# Altium footprint library PcbLib1.PcbLib: 25 footprints (part 2 of 2)
Each footprint in its own frame and in the unit in brackets; x right, y up, seen from the top. Pads: shape width x height; smd on the part's side, far side on the other; paste and mask are expansions set on the pad; w line width, h text height; cw(c..) or ccw(c..) is an arc to the next point about the centre after c.
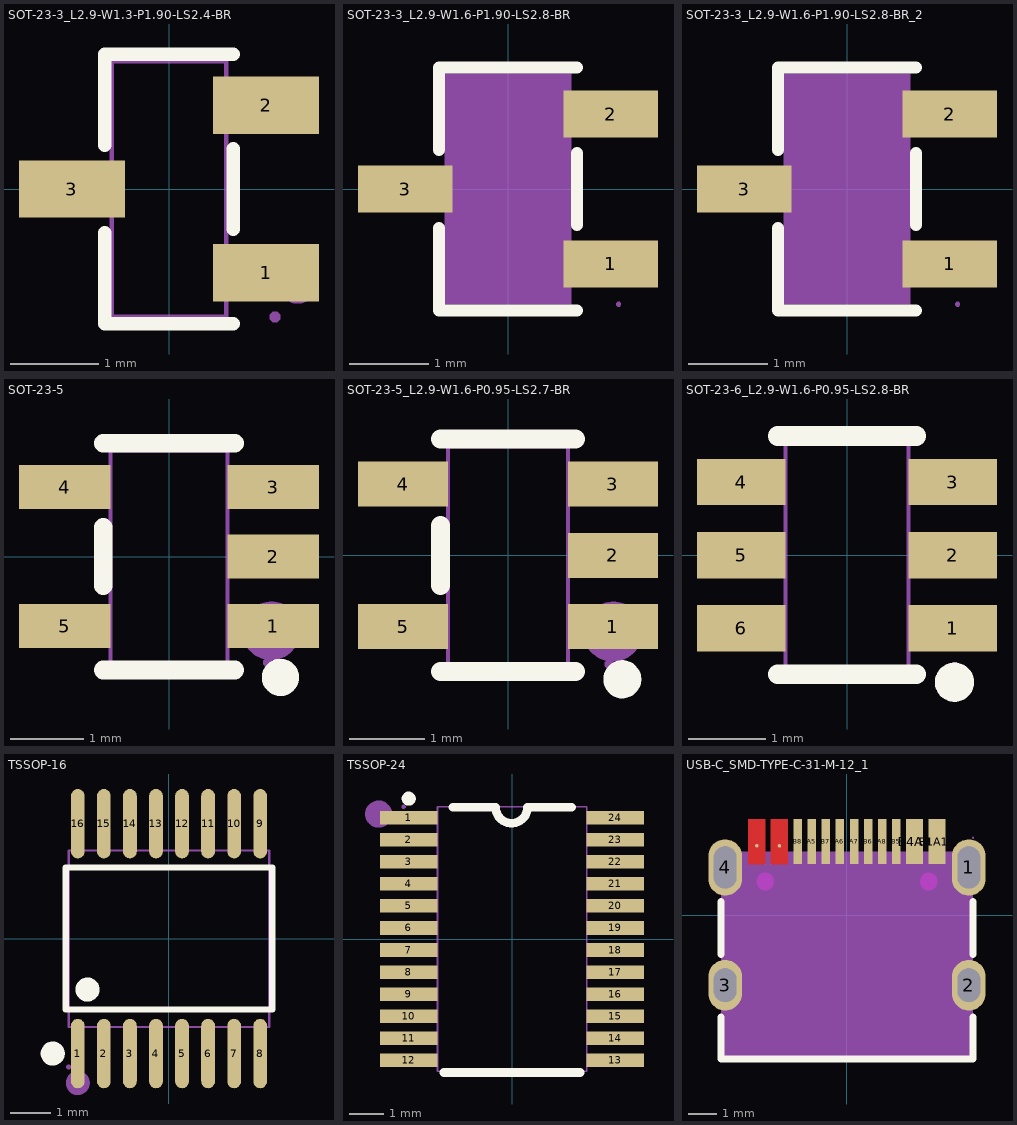
[diagram p1: the footprints below, top view; thin cyan lines are the x and y axes]

## SOT-23-3_L2.9-W1.3-P1.90-LS2.4-BR [mm]
pads (3):
  rect 1.2x0.65 smd: 1(1.1,-0.95) 2(1.1,0.95) 3(-1.1,0)
Top Overlay:
  lines w0.152: -0.726,-0.495 -0.726,-1.526 0.726,-1.526 ; -0.726,0.495 -0.726,1.526 0.726,1.526 ; 0.726,-0.455 0.726,0.455
Mechanical 6:
  circle w0.2: c1.46,-1.1 r0.1
Mechanical 15:
  region: -1.2,-0.215 -1.2,0.215 -0.9,0.215 -0.9,-0.215
  region: -0.91,-0.215 -0.91,0.215 -0.64,0.215 -0.64,-0.215
  region: 0.9,-1.165 0.9,-0.735 1.2,-0.735 1.2,-1.165
  region: 0.64,-1.165 0.64,-0.735 0.91,-0.735 0.91,-1.165
  region: 0.9,0.735 0.9,1.165 1.2,1.165 1.2,0.735
  region: 0.64,0.735 0.64,1.165 0.91,1.165 0.91,0.735
  region: 1.26,-1.45 1.26,-1.475 1.225,-1.51 1.175,-1.51 1.14,-1.475 1.14,-1.45 1.14,-1.425 1.175,-1.39 1.225,-1.39 1.26,-1.425 1.26,-1.45
  lines w0.051: -0.65,-1.45 0.65,-1.45 0.65,1.45 -0.65,1.45 -0.65,-1.45

## SOT-23-3_L2.9-W1.6-P1.90-LS2.8-BR [mm]
pads (3):
  rect 1.2x0.6 smd paste+0 mask+0.051: 1(1.3,-0.95) 2(1.3,0.95) 3(-1.3,0)
Top Overlay:
  lines w0.152: -0.876,-0.495 -0.876,-1.536 0.876,-1.536 ; -0.876,0.495 -0.876,1.536 0.876,1.536 ; 0.876,-0.455 0.876,0.455
Mechanical 6:
  circle w0.2: c1.651,-0.95 r0.1
Mechanical 15:
  region: 1.43,-1.46 1.43,-1.472 1.412,-1.49 1.388,-1.49 1.37,-1.472 1.37,-1.46 1.37,-1.448 1.388,-1.43 1.412,-1.43 1.43,-1.448 1.43,-1.46
  region: -0.8,-1.46 -0.8,1.46 0.8,1.46 0.8,-1.46
  region: 0.95,-1.15 0.95,-0.75 1.4,-0.75 1.4,-1.15
  region: 0.79,-1.15 0.79,-0.75 0.96,-0.75 0.96,-1.15
  region: 0.95,0.75 0.95,1.15 1.4,1.15 1.4,0.75
  region: 0.79,0.75 0.79,1.15 0.96,1.15 0.96,0.75
  region: -0.95,-0.2 -0.95,0.2 -1.4,0.2 -1.4,-0.2
  region: -0.96,-0.2 -0.96,0.2 -0.79,0.2 -0.79,-0.2

## SOT-23-3_L2.9-W1.6-P1.90-LS2.8-BR_2 [mm]
pads (3):
  rect 1.2x0.6 smd paste+0 mask+0.051: 1(1.3,-0.95) 2(1.3,0.95) 3(-1.3,0)
Top Overlay:
  lines w0.152: -0.876,-0.495 -0.876,-1.536 0.876,-1.536 ; -0.876,0.495 -0.876,1.536 0.876,1.536 ; 0.876,-0.455 0.876,0.455
Mechanical 6:
  circle w0.2: c1.651,-0.95 r0.1
Mechanical 15:
  region: 1.43,-1.46 1.43,-1.472 1.412,-1.49 1.388,-1.49 1.37,-1.472 1.37,-1.46 1.37,-1.448 1.388,-1.43 1.412,-1.43 1.43,-1.448 1.43,-1.46
  region: -0.8,-1.46 -0.8,1.46 0.8,1.46 0.8,-1.46
  region: 0.95,-1.15 0.95,-0.75 1.4,-0.75 1.4,-1.15
  region: 0.79,-1.15 0.79,-0.75 0.96,-0.75 0.96,-1.15
  region: 0.95,0.75 0.95,1.15 1.4,1.15 1.4,0.75
  region: 0.79,0.75 0.79,1.15 0.96,1.15 0.96,0.75
  region: -0.95,-0.2 -0.95,0.2 -1.4,0.2 -1.4,-0.2
  region: -0.96,-0.2 -0.96,0.2 -0.79,0.2 -0.79,-0.2

## SOT-23-5 [mm]
pads (5):
  rect 1.25x0.6 smd: 1(1.425,-0.95) 2(1.425,0) 3(1.425,0.95) 4(-1.425,0.95) 5(-1.425,-0.95)
Top Overlay:
  circle w0.254: c1.524,-1.651 r0.127
  lines w0.254: -0.9,-1.55 0.9,-1.55 ; -0.9,-0.4 -0.9,0.4 ; -0.9,1.55 0.9,1.55
Mechanical 6:
  circle w0.4: c1.397,-1.016 r0.2
Mechanical 15:
  region: 0.95,-1.15 0.95,-0.75 1.35,-0.75 1.35,-1.15
  region: 0.79,-1.15 0.79,-0.75 0.96,-0.75 0.96,-1.15
  region: 0.95,-0.2 0.95,0.2 1.35,0.2 1.35,-0.2
  region: 0.79,-0.2 0.79,0.2 0.96,0.2 0.96,-0.2
  region: 0.95,0.75 0.95,1.15 1.35,1.15 1.35,0.75
  region: 0.79,0.75 0.79,1.15 0.96,1.15 0.96,0.75
  region: -1.35,0.75 -1.35,1.15 -0.95,1.15 -0.95,0.75
  region: -0.96,0.75 -0.96,1.15 -0.79,1.15 -0.79,0.75
  region: -1.35,-1.15 -1.35,-0.75 -0.95,-0.75 -0.95,-1.15
  region: -0.96,-1.15 -0.96,-0.75 -0.79,-0.75 -0.79,-1.15
  region: 1.41,-1.45 1.41,-1.475 1.375,-1.51 1.325,-1.51 1.29,-1.475 1.29,-1.45 1.29,-1.425 1.325,-1.39 1.375,-1.39 1.41,-1.425 1.41,-1.45
  lines w0.051: -0.8,-1.45 0.8,-1.45 0.8,1.45 -0.8,1.45 -0.8,-1.45

## SOT-23-5_L2.9-W1.6-P0.95-LS2.7-BR [mm] "AP2112K-3.3TRG1(MS)"
pads (5):
  rect 1.2x0.6 smd: 1(1.4,-0.95) 2(1.4,0) 3(1.4,0.95) 4(-1.4,0.95) 5(-1.4,-0.95)
Top Overlay:
  circle w0.254: c1.524,-1.651 r0.127
  lines w0.254: -0.9,-1.55 0.9,-1.55 ; -0.9,-0.4 -0.9,0.4 ; -0.9,1.55 0.9,1.55
Mechanical 6:
  circle w0.4: c1.397,-1.016 r0.2
Mechanical 15:
  region: 1.41,-1.45 1.41,-1.475 1.375,-1.51 1.325,-1.51 1.29,-1.475 1.29,-1.45 1.29,-1.425 1.325,-1.39 1.375,-1.39 1.41,-1.425 1.41,-1.45
  region: -0.96,-1.15 -0.96,-0.75 -0.79,-0.75 -0.79,-1.15
  region: -1.35,-1.15 -1.35,-0.75 -0.95,-0.75 -0.95,-1.15
  region: -0.96,0.75 -0.96,1.15 -0.79,1.15 -0.79,0.75
  region: -1.35,0.75 -1.35,1.15 -0.95,1.15 -0.95,0.75
  region: 0.79,0.75 0.79,1.15 0.96,1.15 0.96,0.75
  region: 0.95,0.75 0.95,1.15 1.35,1.15 1.35,0.75
  region: 0.79,-0.2 0.79,0.2 0.96,0.2 0.96,-0.2
  region: 0.95,-0.2 0.95,0.2 1.35,0.2 1.35,-0.2
  region: 0.79,-1.15 0.79,-0.75 0.96,-0.75 0.96,-1.15
  region: 0.95,-1.15 0.95,-0.75 1.35,-0.75 1.35,-1.15
  lines w0.051: -0.8,-1.45 -0.8,1.45 0.8,1.45 0.8,-1.45 -0.8,-1.45

## SOT-23-6_L2.9-W1.6-P0.95-LS2.8-BR [mm]
pads (6):
  rect 1.15x0.6 smd paste+0 mask+0.051: 1(1.375,-0.95) 2(1.375,0) 3(1.375,0.95) 4(-1.375,0.95) 5(-1.375,0) 6(-1.375,-0.95)
Top Overlay:
  circle w0.254: c1.397,-1.651 r0.127
  lines w0.254: -0.9,-1.55 0.9,-1.55 ; -0.9,1.55 0.9,1.55
Mechanical 6:
  circle w0.2: c1.4,-0.95 r0.1
Mechanical 15:
  region: 0.935,1.165 0.935,0.735 0.79,0.735 0.79,1.165
  region: 0.935,0.215 0.935,-0.215 0.79,-0.215 0.79,0.215
  region: 0.935,-0.735 0.935,-1.165 0.79,-1.165 0.79,-0.735
  region: -0.935,-1.165 -0.935,-0.735 -0.79,-0.735 -0.79,-1.165
  region: -0.935,-0.215 -0.935,0.215 -0.79,0.215 -0.79,-0.215
  region: 0.925,-1.165 0.925,-0.735 1.4,-0.735 1.4,-1.165
  region: 0.925,-0.215 0.925,0.215 1.4,0.215 1.4,-0.215
  region: 0.925,0.735 0.925,1.165 1.4,1.165 1.4,0.735
  region: -0.935,0.735 -0.935,1.165 -0.79,1.165 -0.79,0.735
  region: -0.925,0.735 -0.925,1.165 -1.4,1.165 -1.4,0.735
  region: -0.925,-0.215 -0.925,0.215 -1.4,0.215 -1.4,-0.215
  region: -0.925,-1.165 -0.925,-0.735 -1.4,-0.735 -1.4,-1.165
  region: 1.46,-1.45 1.46,-1.475 1.425,-1.51 1.375,-1.51 1.34,-1.475 1.34,-1.45 1.34,-1.425 1.375,-1.39 1.425,-1.39 1.46,-1.425 1.46,-1.45
  lines w0.051: -0.8,-1.45 0.8,-1.45 0.8,1.45 -0.8,1.45 -0.8,-1.45

## TSSOP-16 [mm]
pads (16):
  oval 0.343x1.731 smd: 1(-2.275,-2.866) 2(-1.625,-2.866) 3(-0.975,-2.866) 4(-0.325,-2.866) 5(0.325,-2.866) 6(0.975,-2.866) 7(1.625,-2.866) 8(2.275,-2.866) 9(2.275,2.866) 10(1.625,2.866) 11(0.975,2.866) 12(0.325,2.866) 13(-0.325,2.866) 14(-0.975,2.866) 15(-1.625,2.866) 16(-2.275,2.866)
Top Overlay:
  circle w0.3: c-2.032,-1.27 r0.15
  circle w0.3: c-2.899,-2.866 r0.15
  lines w0.152: -2.576,-1.771 -2.576,1.772 2.576,1.772 2.576,-1.771 -2.576,-1.771
Mechanical 6:
  circle w0.3: c-2.275,-3.6 r0.15
Mechanical 15:
  drawing of 37 lines, arcs and shapes, not listed

## TSSOP-24 [mm]
pads (24):
  rect 1.7x0.4 smd: 1(-3.048,3.575) 2(-3.048,2.925) 3(-3.048,2.275) 4(-3.048,1.625) 5(-3.048,0.975) 6(-3.048,0.325) 7(-3.048,-0.325) 8(-3.048,-0.975) 9(-3.048,-1.625) 10(-3.048,-2.275) 11(-3.048,-2.925) 12(-3.048,-3.575) 13(3.048,-3.575) 14(3.048,-2.925) 15(3.048,-2.275) 16(3.048,-1.625) 17(3.048,-0.975) 18(3.048,-0.325) 19(3.048,0.325) 20(3.048,0.975) 21(3.048,1.625) 22(3.048,2.275) 23(3.048,2.925) 24(3.048,3.575)
Top Overlay:
  circle w0.254: c-3.048,4.14 r0.08
  lines w0.254: -2.007,-3.937 2.007,-3.937 ; -1.753,3.886 -0.483,3.886 ccw(c-0.013,3.886) 0.457,3.886 ; 0.483,3.886 1.753,3.886
Mechanical 6:
  circle w0.4: c-3.937,3.683 r0.2
Mechanical 15:
  drawing of 53 lines, arcs and shapes, not listed

## USB-C_SMD-TYPE-C-31-M-12_1 [mm]
pads (16):
  oval 1.2x2 hole 0.8 slot 1.5 at 90 deg paste-2539.97 mask+0.051: 1(4.325,1.706) 4(-4.325,1.706)
  oval 1.2x1.8 hole 0.8 slot 1.2 at 90 deg copper offset 0,0 paste-2539.97 mask+0.051: 2(4.325,-2.474) 3(-4.325,-2.474)
  round 0.12 smd: A1B12(-3.2,2.474) A4B9(-2.4,2.474)
  rect 0.3x1.6 smd paste+0 mask+0.025: A5(-1.25,2.624) A6(-0.25,2.624) A7(0.25,2.624) A8(1.25,2.624) B5(1.75,2.624) B6(0.75,2.624) B7(-0.75,2.624) B8(-1.75,2.624)
  rect 0.6x1.6 smd paste+0 mask+0.025: B1A12(3.2,2.624) B4A9(2.4,2.624)
Top Layer:
  region: -2.1,1.824 -2.4,1.824 -2.7,1.824 -2.7,3.424 -2.4,3.424 -2.1,3.424
  region: -2.9,1.824 -3.2,1.824 -3.5,1.824 -3.5,3.424 -3.2,3.424 -2.9,3.424
Top Overlay:
  lines w0.254: -4.469,-3.613 -4.469,-5.094 4.471,-5.094 4.471,-3.612 ; -4.469,-1.376 -4.469,0.487 ; 4.471,-1.376 4.471,0.488
Top Paste:
  drawing of 16 lines, arcs and shapes, not listed
Keep-Out Layer:
  board cut-out: 3.2,1.206 3.2,1.146 3.154,1.036 3.07,0.951 2.96,0.906 2.84,0.906 2.73,0.951 2.646,1.036 2.6,1.146 2.6,1.206 2.6,1.265 2.646,1.376 2.73,1.46 2.84,1.506 2.96,1.506 3.07,1.46 3.154,1.376 3.2,1.265 3.2,1.206
  board cut-out: -2.6,1.206 -2.6,1.146 -2.646,1.036 -2.73,0.951 -2.84,0.906 -2.96,0.906 -3.07,0.951 -3.154,1.036 -3.2,1.146 -3.2,1.206 -3.2,1.265 -3.154,1.376 -3.07,1.46 -2.96,1.506 -2.84,1.506 -2.73,1.46 -2.646,1.376 -2.6,1.265 -2.6,1.206
Keep-Out Layer:
  circle w0.025: c2.9,1.206 r0.3
  circle w0.025: c-2.9,1.206 r0.3
  region: 3.2,1.206 3.2,1.146 3.154,1.036 3.07,0.951 2.96,0.906 2.84,0.906 2.73,0.951 2.646,1.036 2.6,1.146 2.6,1.206 2.6,1.265 2.646,1.376 2.73,1.46 2.84,1.506 2.96,1.506 3.07,1.46 3.154,1.376 3.2,1.265 3.2,1.206
  region: -2.6,1.206 -2.6,1.146 -2.646,1.036 -2.73,0.951 -2.84,0.906 -2.96,0.906 -3.07,0.951 -3.154,1.036 -3.2,1.146 -3.2,1.206 -3.2,1.265 -3.154,1.376 -3.07,1.46 -2.96,1.506 -2.84,1.506 -2.73,1.46 -2.646,1.376 -2.6,1.265 -2.6,1.206
Mechanical 1:
  circle w0.025: c2.9,1.206 r0.3
  circle w0.025: c-2.9,1.206 r0.3
Mechanical 6:
  circle w0.25: c-2.9,1.206 r0.125
  circle w0.25: c2.9,1.206 r0.125
Mechanical 15:
  region: 3,2.756 3.4,2.756 3.4,2.056 3,2.056
  region: 2.2,2.756 2.6,2.756 2.6,2.056 2.2,2.056
  region: -2.6,2.756 -2.2,2.756 -2.2,2.056 -2.6,2.056
  region: -3.4,2.756 -3,2.756 -3,2.056 -3.4,2.056
  region: -1.85,2.756 -1.65,2.756 -1.65,2.056 -1.85,2.056
  region: -1.35,2.756 -1.15,2.756 -1.15,2.056 -1.35,2.056
  region: -0.85,2.756 -0.65,2.756 -0.65,2.056 -0.85,2.056
  region: -0.35,2.756 -0.15,2.756 -0.15,2.056 -0.35,2.056
  region: 0.15,2.756 0.35,2.756 0.35,2.056 0.15,2.056
  region: 0.65,2.756 0.85,2.756 0.85,2.056 0.65,2.056
  region: 1.15,2.756 1.35,2.756 1.35,2.056 1.15,2.056
  region: 1.65,2.756 1.85,2.756 1.85,2.056 1.65,2.056
  region: -4.475,2.256 -4.175,2.256 -4.175,1.156 -4.475,1.156
  region: 4.175,2.256 4.475,2.256 4.475,1.156 4.175,1.156
  region: 4.175,-2.074 4.475,-2.074 4.475,-2.874 4.175,-2.874
  region: -4.475,-2.074 -4.175,-2.074 -4.175,-2.874 -4.475,-2.874
  region: -4.47,-5.094 -4.47,2.256 4.47,2.256 4.47,-5.094
  region: 4.505,2.756 4.505,2.744 4.487,2.726 4.463,2.726 4.445,2.744 4.445,2.756 4.445,2.769 4.463,2.786 4.487,2.786 4.505,2.769 4.505,2.756